# Altium footprint library SnakeCardNative.PcbLib: 15 footprints
Each footprint in its own frame and in the unit in brackets; x right, y up, seen from the top. Pads: shape width x height; smd on the part's side, far side on the other; paste and mask are expansions set on the pad; w line width, h text height; cw(c..) or ccw(c..) is an arc to the next point about the centre after c.
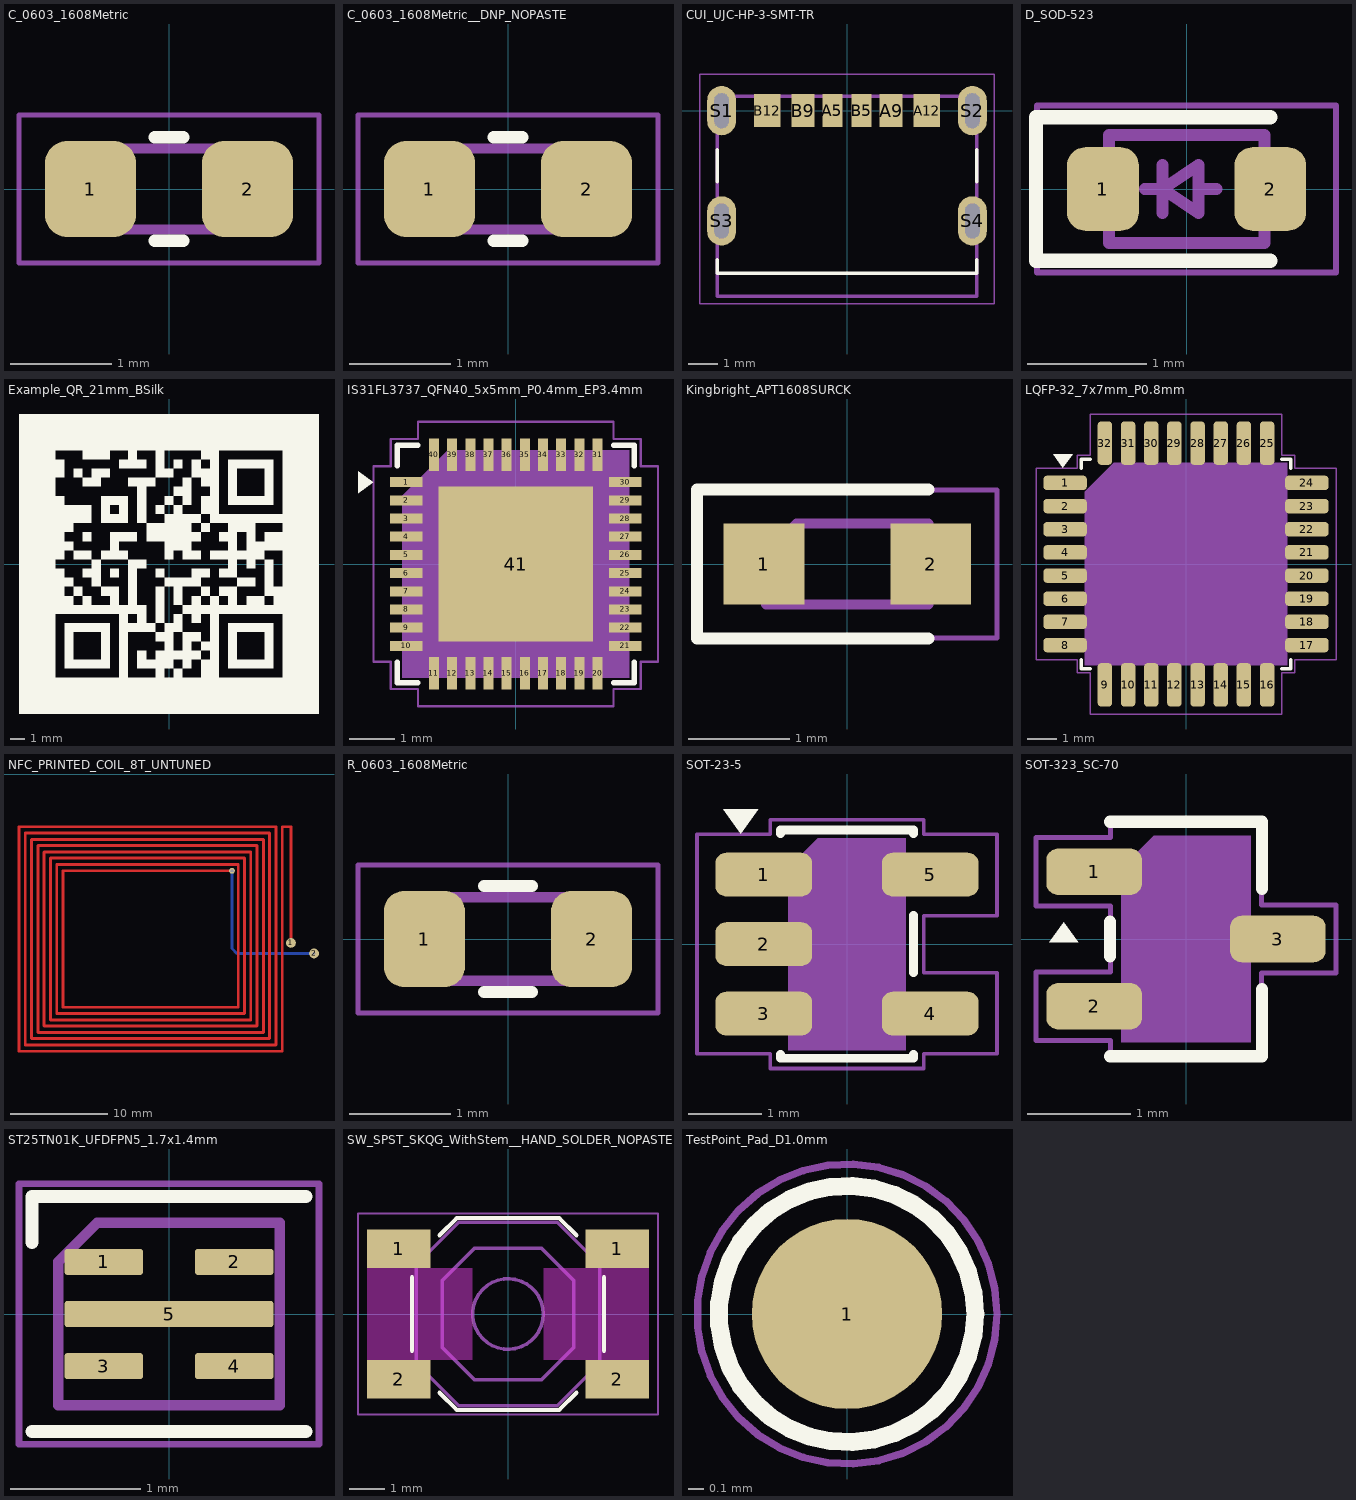
[diagram p0: the footprints below, top view; thin cyan lines are the x and y axes]

## C_0603_1608Metric [mm]
pads (2):
  rrect50% 0.9x0.95 smd: 1(-0.775,0) 2(0.775,0)
F.SilkS:
  lines w0.12: -0.141,-0.51 0.141,-0.51 ; -0.141,0.51 0.141,0.51
F.Fab:
  lines w0.1: -0.8,-0.4 0.8,-0.4 0.8,0.4 -0.8,0.4 -0.8,-0.4
  text "'.Designator'" at -1.619,-0.336 h0.4
F.CrtYd:
  lines w0.05: -1.48,-0.73 1.48,-0.73 1.48,0.73 -1.48,0.73 -1.48,-0.73

## C_0603_1608Metric__DNP_NOPASTE [mm]
pads (2):
  rrect50% 0.9x0.95 smd paste-0.485: 1(-0.775,0) 2(0.775,0)
F.SilkS:
  lines w0.12: -0.141,-0.51 0.141,-0.51 ; -0.141,0.51 0.141,0.51
F.Fab:
  lines w0.1: -0.8,-0.4 -0.8,0.4 0.8,0.4 0.8,-0.4 -0.8,-0.4
  text "'.Designator'" at -1.619,-0.336 h0.4
F.CrtYd:
  lines w0.05: -1.48,-0.73 -1.48,0.73 1.48,0.73 1.48,-0.73 -1.48,-0.73

## CUI_UJC-HP-3-SMT-TR [mm]
pads (10):
  rect 0.7x1.15 smd mask+0.05: A5(-0.5,0.005) B5(0.5,0.005)
  rect 0.8x1.15 smd mask+0.05: A9(1.52,0.005) B9(-1.52,0.005)
  rect 0.9x1.15 smd mask+0.05: A12(2.75,0.005) B12(-2.75,0.005)
  rrect100% 1x1.7 hole 1.2 slot 0.5 at 0 deg paste-2539.97 mask+0.05: S1(-4.32,0) S2(4.32,0) S3(-4.32,-3.8) S4(4.32,-3.8)
F.SilkS:
  lines w0.127: -4.47,-5.15 -4.47,-5.6 4.47,-5.6 4.47,-5.15 ; -4.47,-2.45 -4.47,-1.35 ; 4.47,-2.45 4.47,-1.35
F.Fab:
  lines w0.127: -4.47,-6.4 4.47,-6.4 4.47,0.5 -4.47,0.5 -4.47,-6.4
  text "'.Designator'" at -2.95,-4.04 h1
F.CrtYd:
  lines w0.05: -5.07,-6.65 5.07,-6.65 5.07,1.25 -5.07,1.25 -5.07,-6.65

## D_SOD-523 [mm]
pads (2):
  rrect50% 0.6x0.7 smd: 1(-0.7,0) 2(0.7,0)
F.SilkS:
  lines w0.12: 0.7,-0.6 -1.26,-0.6 -1.26,0.6 0.7,0.6
F.Fab:
  lines w0.1: -0.35,0 -0.2,0 ; -0.2,-0.2 -0.2,0.2 ; 0.1,0 0.25,0 ; -0.2,0 0.1,-0.2 0.1,0.2 -0.2,0 ; -0.65,-0.45 -0.65,0.45 0.65,0.45 0.65,-0.45 -0.65,-0.45
  text "'.Designator'" at -4.047,0.46 h1
F.CrtYd:
  lines w0.05: -1.25,-0.7 -1.25,0.7 1.25,0.7 1.25,-0.7 -1.25,-0.7

## Example_QR_21mm_BSilk [mm]
F.SilkS:
  drawing of 195 lines, arcs and shapes, not listed

## IS31FL3737_QFN40_5x5mm_P0.4mm_EP3.4mm [mm]
pads (50):
  rect 0.715x0.22 smd: 1(-2.408,1.8) 2(-2.408,1.4) 3(-2.408,1) 4(-2.408,0.6) 5(-2.408,0.2) 6(-2.408,-0.2) 7(-2.408,-0.6) 8(-2.408,-1) 9(-2.408,-1.4) 10(-2.408,-1.8) 21(2.408,-1.8) 22(2.408,-1.4) 23(2.408,-1) 24(2.408,-0.6) 25(2.408,-0.2) 26(2.408,0.2) 27(2.408,0.6) 28(2.408,1) 29(2.408,1.4) 30(2.408,1.8)
  rect 0.22x0.715 smd: 11(-1.8,-2.408) 12(-1.4,-2.408) 13(-1,-2.408) 14(-0.6,-2.408) 15(-0.2,-2.408) 16(0.2,-2.408) 17(0.6,-2.408) 18(1,-2.408) 19(1.4,-2.408) 20(1.8,-2.408) 31(1.8,2.408) 32(1.4,2.408) 33(1,2.408) 34(0.6,2.408) 35(0.2,2.408) 36(-0.2,2.408) 37(-0.6,2.408) 38(-1,2.408) 39(-1.4,2.408) 40(-1.8,2.408)
  rect 3.4x3.4 smd paste-1.71: 41(0,0)
  rrect25% 0.9x0.9 on Top Paste: ""(-1.1,-1.1) ""(-1.1,0) ""(-1.1,1.1) ""(0,-1.1) ""(0,0) ""(0,1.1) ""(1.1,-1.1) ""(1.1,0) ""(1.1,1.1)
F.SilkS:
  region: -3.14,1.8 -3.47,1.56 -3.47,2.04
  lines w0.12: -2.61,-2.16 -2.61,-2.61 -2.16,-2.61 ; -2.61,2.16 -2.61,2.61 -2.16,2.61 ; 2.16,-2.61 2.61,-2.61 2.61,-2.16 ; 2.16,2.61 2.61,2.61 2.61,2.16
F.Fab:
  region: 2.5,-2.5 -2.5,-2.5 -2.5,1.5 -1.5,2.5 2.5,2.5
  text "'.Designator'" at -4.047,-0.84 h1
F.CrtYd:
  lines w0.05: -3.13,-2.15 -3.13,2.15 -2.75,2.15 -2.75,2.75 -2.15,2.75 -2.15,3.13 2.15,3.13 2.15,2.75 2.75,2.75 2.75,2.15 3.13,2.15 3.13,-2.15 2.75,-2.15 2.75,-2.75 2.15,-2.75 2.15,-3.13 -2.15,-3.13 -2.15,-2.75 -2.75,-2.75 -2.75,-2.15 -3.13,-2.15

## Kingbright_APT1608SURCK [mm]
pads (2):
  rect 0.8x0.8 smd: 1(-0.825,0) 2(0.825,0)
F.SilkS:
  lines w0.12: 0.8,-0.735 -1.485,-0.735 -1.485,0.735 0.8,0.735
F.Fab:
  lines w0.1: -0.8,-0.4 -0.8,0.1 -0.5,0.4 0.8,0.4 0.8,-0.4 -0.8,-0.4
  text "'.Designator'" at -1.619,-0.336 h0.4
F.CrtYd:
  lines w0.05: -1.48,-0.73 -1.48,0.73 1.48,0.73 1.48,-0.73 -1.48,-0.73

## LQFP-32_7x7mm_P0.8mm [mm]
pads (32):
  rrect50% 1.5x0.5 smd: 1(-4.175,2.8) 2(-4.175,2) 3(-4.175,1.2) 4(-4.175,0.4) 5(-4.175,-0.4) 6(-4.175,-1.2) 7(-4.175,-2) 8(-4.175,-2.8) 17(4.175,-2.8) 18(4.175,-2) 19(4.175,-1.2) 20(4.175,-0.4) 21(4.175,0.4) 22(4.175,1.2) 23(4.175,2) 24(4.175,2.8)
  rrect50% 0.5x1.5 smd: 9(-2.8,-4.175) 10(-2,-4.175) 11(-1.2,-4.175) 12(-0.4,-4.175) 13(0.4,-4.175) 14(1.2,-4.175) 15(2,-4.175) 16(2.8,-4.175) 25(2.8,4.175) 26(2,4.175) 27(1.2,4.175) 28(0.4,4.175) 29(-0.4,4.175) 30(-1.2,4.175) 31(-2,4.175) 32(-2.8,4.175)
F.SilkS:
  region: -4.25,3.32 -4.59,3.79 -3.91,3.79
  lines w0.12: -3.61,-3.31 -3.61,-3.61 -3.31,-3.61 ; -3.61,3.31 -3.61,3.61 -3.31,3.61 ; 3.31,-3.61 3.61,-3.61 3.61,-3.31 ; 3.31,3.61 3.61,3.61 3.61,3.31
F.Fab:
  region: 3.5,-3.5 -3.5,-3.5 -3.5,2.5 -2.5,3.5 3.5,3.5
  text "'.Designator'" at -4.047,-0.84 h1
F.CrtYd:
  lines w0.05: -5.18,-3.3 -5.18,3.3 -3.75,3.3 -3.75,3.75 -3.3,3.75 -3.3,5.18 3.3,5.18 3.3,3.75 3.75,3.75 3.75,3.3 5.18,3.3 5.18,-3.3 3.75,-3.3 3.75,-3.75 3.3,-3.75 3.3,-5.18 -3.3,-5.18 -3.3,-3.75 -3.75,-3.75 -3.75,-3.3 -5.18,-3.3

## NFC_PRINTED_COIL_8T_UNTUNED [mm]
pads (3):
  round 0.6 hole 0.3 paste-2539.97 mask-0.31: 1(27.4,-9.95)
  round 1.016 smd paste-1.016 mask+0: 1(33.502,-17.399)
  round 1.016 hole 0.3 paste-2539.97 mask+0: 2(35.89,-18.491)
F.Cu:
  lines w0.3: 27.4,-9.95 9.95,-9.95 9.95,-24.05 28.05,-24.05 28.05,-9.3 9.3,-9.3 9.3,-24.7 28.7,-24.7 28.7,-8.65 8.65,-8.65 8.65,-25.35 29.35,-25.35 29.35,-8 8,-8 8,-26 30,-26 30,-7.35 7.35,-7.35 7.35,-26.65 30.65,-26.65 30.65,-6.7 6.7,-6.7 6.7,-27.3 31.3,-27.3 31.3,-6.05 6.05,-6.05 6.05,-27.95 31.95,-27.95 31.95,-5.4 5.4,-5.4 5.4,-28.6 32.6,-28.6 32.6,-5.4 33.5,-5.4 33.5,-17.4
B.Cu:
  lines w0.3: 27.4,-9.95 27.4,-17.983 27.908,-18.491 35.89,-18.491

## R_0603_1608Metric [mm]
pads (2):
  rrect50% 0.8x0.95 smd: 1(-0.825,0) 2(0.825,0)
F.SilkS:
  lines w0.12: -0.237,-0.523 0.237,-0.523 ; -0.237,0.523 0.237,0.523
F.Fab:
  lines w0.1: -0.8,-0.413 -0.8,0.413 0.8,0.413 0.8,-0.413 -0.8,-0.413
  text "'.Designator'" at -1.619,-0.336 h0.4
F.CrtYd:
  lines w0.05: -1.48,-0.73 -1.48,0.73 1.48,0.73 1.48,-0.73 -1.48,-0.73

## SOT-23-5 [mm]
pads (5):
  rrect50% 1.325x0.6 smd: 1(-1.138,0.95) 2(-1.138,0) 3(-1.138,-0.95) 4(1.138,-0.95) 5(1.138,0.95)
F.SilkS:
  region: -1.45,1.51 -1.69,1.84 -1.21,1.84
  lines w0.12: -0.91,-1.51 -0.91,-1.56 0.91,-1.56 0.91,-1.51 ; -0.91,1.51 -0.91,1.56 0.91,1.56 0.91,1.51 ; 0.91,-0.39 0.91,0.39
F.Fab:
  region: 0.8,-1.45 -0.8,-1.45 -0.8,1.05 -0.4,1.45 0.8,1.45
  text "'.Designator'" at 0.607,-2.916 h0.72
F.CrtYd:
  lines w0.05: -2.05,-1.5 -2.05,1.5 -1.05,1.5 -1.05,1.7 1.05,1.7 1.05,1.5 2.05,1.5 2.05,0.39 1.05,0.39 1.05,-0.39 2.05,-0.39 2.05,-1.5 1.05,-1.5 1.05,-1.7 -1.05,-1.7 -1.05,-1.5 -2.05,-1.5

## SOT-323_SC-70 [mm]
pads (3):
  rrect50% 0.925x0.45 smd: 1(-0.887,0.65) 2(-0.887,-0.65) 3(0.887,0)
F.SilkS:
  region: -1.04,-0.03 -1.32,-0.03 -1.18,0.16
  lines w0.12: -0.735,-1.135 0.735,-1.135 0.735,-0.485 ; -0.735,-0.165 -0.735,0.165 ; -0.735,1.135 0.735,1.135 0.735,0.485
F.Fab:
  region: 0.625,-1 -0.625,-1 -0.625,0.687 -0.312,1 0.625,1
  text "'.Designator'" at 0.425,-2.028 h0.5
F.CrtYd:
  lines w0.05: -1.45,-0.98 -1.45,-0.32 -0.73,-0.32 -0.73,0.32 -1.45,0.32 -1.45,0.98 -0.73,0.98 -0.73,1.1 0.73,1.1 0.73,0.33 1.45,0.33 1.45,-0.33 0.73,-0.33 0.73,-1.1 -0.73,-1.1 -0.73,-0.98 -1.45,-0.98

## ST25TN01K_UFDFPN5_1.7x1.4mm [mm]
pads (5):
  rrect20% 0.6x0.2 smd mask+0.03: 1(-0.5,0.4) 2(0.5,0.4) 3(-0.5,-0.4) 4(0.5,-0.4)
  rrect20% 1.6x0.2 smd mask+0.03: 5(0,0)
F.SilkS:
  lines w0.1: -1.05,-0.9 1.05,-0.9 ; -1.05,0.55 -1.05,0.9 1.05,0.9
F.Fab:
  lines w0.08: -0.85,-0.7 -0.85,0.4 -0.55,0.7 0.85,0.7 0.85,-0.7 -0.85,-0.7
  text "'.Designator'" at -1.424,-0.302 h0.35
F.CrtYd:
  lines w0.05: -1.15,-1 -1.15,1 1.15,1 1.15,-1 -1.15,-1

## SW_SPST_SKQG_WithStem__HAND_SOLDER_NOPASTE [mm]
pads (4):
  rect 1.8x1.1 smd paste-0.91: 1(-3.1,1.85) 1(3.1,1.85) 2(-3.1,-1.85) 2(3.1,-1.85)
F.Cu keep-out:
  rectangle: 1,-1.3 4,1.3
  rectangle: -4,-1.3 -1,1.3
F.SilkS:
  lines w0.12: -2.72,-1.04 -2.72,1.04 ; -1.94,-2.23 -1.45,-2.72 1.45,-2.72 1.94,-2.23 ; -1.94,2.23 -1.45,2.72 1.45,2.72 1.94,2.23 ; 2.72,-1.04 2.72,1.04
F.Fab:
  circle w0.1: c0,0 r1
  lines w0.1: -2.6,-1.4 -1.4,-2.6 1.4,-2.6 2.6,-1.4 2.6,1.4 1.4,2.6 -1.4,2.6 -2.6,1.4 -2.6,-1.4 ; -1.865,-0.95 -0.95,-1.865 0.95,-1.865 1.865,-0.95 1.865,0.95 0.95,1.865 -0.95,1.865 -1.865,0.95 -1.865,-0.95
  text "'.Designator'" at -1.619,-0.336 h0.4
F.CrtYd:
  lines w0.05: -4.25,-2.85 4.25,-2.85 4.25,2.85 -4.25,2.85 -4.25,-2.85
Cmts.User:
  text "No F.Cu tracks" at 1.47,-0.33 h0.2
  text "KEEP-OUT ZONE" at 1.324,0.07 h0.2
  text "No F.Cu tracks" at -3.53,-0.33 h0.2
  text "KEEP-OUT ZONE" at -3.676,0.07 h0.2

## TestPoint_Pad_D1.0mm [mm]
pads (1):
  round 1.27 smd paste-1.27 mask+0: 1(0,0)
F.SilkS:
  circle w0.12: c0,0 r0.855
F.Fab:
  text "'.Designator'" at -4.047,0.61 h1
F.CrtYd:
  circle w0.05: c0,0 r1